# Altium schematic symbol library HX711.SchLib: 1 symbol
Pins are listed as number, name and electrical type; pins without a type are passive.

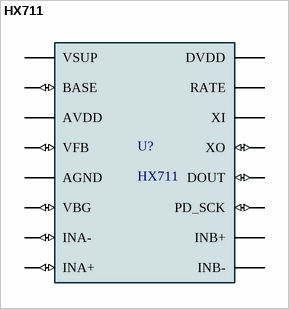
[diagram p0: symbol HX711]

## HX711
designator U?
Precision 24-bit analog-to-digital converter (ADC) designed for weigh scales and industrial control applications to interface directly with a bridge sensor; MF: AVIA SEMICONDUCTOR; SnapEDA_Link: https://www.snapeda.com/parts/HX711/AVIA+SEMICONDUCTOR/view-part/?ref=snap; Package: None; Value: HX711; MP: HX711; Check_prices: https://www.snapeda.com/parts/HX711/AVIA+SEMICONDUCTOR/view-part/?ref=eda
footprint HX711 (SOP127P600X180-16N)
pins: 1 VSUP (power), 2 BASE (io), 3 AVDD (power), 4 VFB (io), 5 AGND, 6 VBG (io), 7 INA- (io), 8 INA+ (io), 9 INB-, 10 INB+, 11 PD_SCK (io), 12 DOUT (io), 13 XO (io), 14 XI, 15 RATE, 16 DVDD (power)